# Altium schematic symbol library S-8261AAJMD-G2JT2G.SchLib: 1 symbol
Pins are listed as number, name and electrical type; pins without a type are passive.

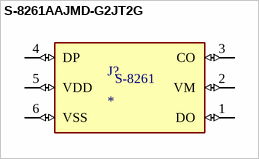
[diagram p0: symbol S-8261AAJMD-G2JT2G]

## S-8261AAJMD-G2JT2G
designator J?
Battery Battery Protection IC Lithium Ion/Polymer SOT-23-6; MP: S-8261AAJMD-G2JT2G; MF: ABLIC U.S.A.; Check_prices: https://www.snapeda.com/parts/S-8261AAJMD-G2JT2G/ABLIC+U.S.A.+Inc./view-part/?ref=eda; Value: *; Availability: In Stock; Price: None; Package: SOT-23-6 ABLIC U.S.A. Inc.; SnapEDA_Link: https://www.snapeda.com/parts/S-8261AAJMD-G2JT2G/ABLIC+U.S.A.+Inc./view-part/?ref=snap; Purchase-URL: https://pricing.snapeda.com/search/part/S-8261AAJMD-G2JT2G/?ref=eda
footprint SOT95P275X135-6
pins: 1 DO (io), 2 VM (io), 3 CO (io), 4 DP (io), 5 VDD (io), 6 VSS (io)
text: S-8261